# Altium footprint library PcbLib1.PcbLib: 69 footprints (part 2 of 5)
Each footprint in its own frame and in the unit in brackets; x right, y up, seen from the top. Pads: shape width x height; smd on the part's side, far side on the other; paste and mask are expansions set on the pad; w line width, h text height; cw(c..) or ccw(c..) is an arc to the next point about the centre after c.
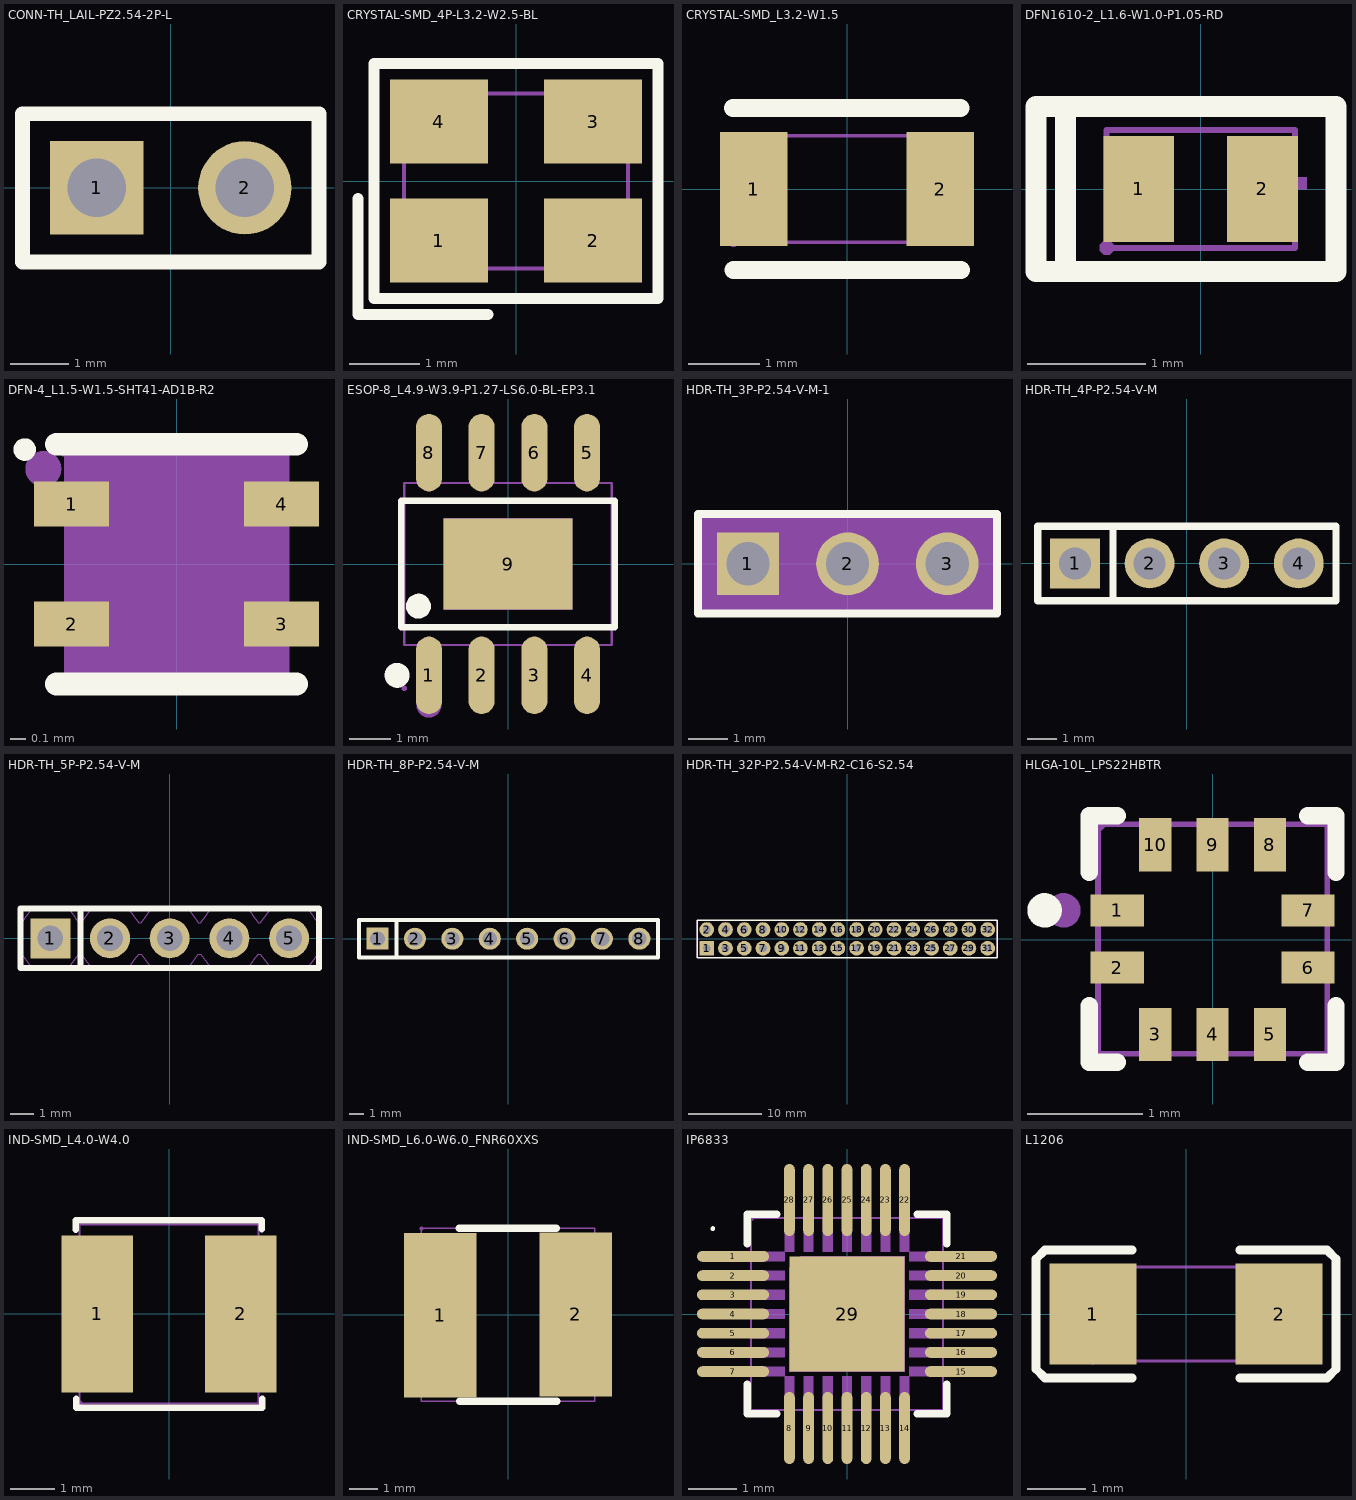
[diagram p1: the footprints below, top view; thin cyan lines are the x and y axes]

## CONN-TH_LAIL-PZ2.54-2P-L [mm]
pads (2):
  rect 1.6x1.6 hole 1 paste-2539.97 mask+0.05: 1(-1.27,0)
  round 1.6 hole 1 paste-2539.97 mask+0.05: 2(1.27,0)
Top Overlay:
  lines w0.254: -2.54,-1.27 -2.54,1.27 2.54,1.27 2.54,-1.27 -2.54,-1.27
Mechanical 6:
  lines w0.051: -2.54,-1.25 -2.54,1.25 2.54,1.25 2.54,-1.25 -2.54,-1.25
Mechanical 8:
  region: -2.48,-1.25 -2.48,-1.275 -2.515,-1.31 -2.565,-1.31 -2.6,-1.275 -2.6,-1.25 -2.6,-1.225 -2.565,-1.19 -2.515,-1.19 -2.48,-1.225 -2.48,-1.25
Mechanical 9:
  region: -1.59,0.32 -0.95,0.32 -0.95,-0.32 -1.59,-0.32
  region: 0.95,0.32 1.59,0.32 1.59,-0.32 0.95,-0.32

## CRYSTAL-SMD_4P-L3.2-W2.5-BL [mm]
pads (4):
  rect 1.4x1.2 smd: 1(-1.1,-0.85) 2(1.1,-0.85) 3(1.1,0.85) 4(-1.1,0.85)
Top Overlay:
  lines w0.152: -2.257,-0.25 -2.257,-1.907 -0.4,-1.907 ; -2.029,-1.678 -2.029,1.679 2.029,1.679 2.029,-1.678 -2.029,-1.678
Mechanical 2:
  circle w0.254: c-1.27,-0.889 r0.127
Mechanical 6:
  lines w0.051: -1.6,-1.25 -1.6,1.25 1.6,1.25 1.6,-1.25 -1.6,-1.25
Mechanical 8:
  region: -1.54,-1.25 -1.54,-1.275 -1.575,-1.31 -1.625,-1.31 -1.66,-1.275 -1.66,-1.25 -1.66,-1.225 -1.625,-1.19 -1.575,-1.19 -1.54,-1.225 -1.54,-1.25
Mechanical 9:
  region: -1.5,1.15 -0.6,1.15 -0.6,0.35 -1.5,0.35
  region: 0.6,1.15 1.5,1.15 1.5,0.35 0.6,0.35
  region: 0.6,-0.35 1.5,-0.35 1.5,-1.15 0.6,-1.15
  region: -1.5,-0.35 -0.6,-0.35 -0.6,-1.15 -1.5,-1.15

## CRYSTAL-SMD_L3.2-W1.5 [mm]
pads (2):
  rect 0.95x1.6 smd: 1(-1.308,0) 2(1.308,0)
Top Overlay:
  lines w0.254: -1.603,1.14 1.597,1.14 ; -1.597,-1.14 1.603,-1.14
Mechanical 6:
  lines w0.051: -1.597,-0.75 -1.597,0.75 1.603,0.75 1.603,-0.75 -1.597,-0.75
Mechanical 8:
  region: -1.537,-0.75 -1.537,-0.775 -1.573,-0.81 -1.622,-0.81 -1.657,-0.775 -1.657,-0.75 -1.657,-0.725 -1.622,-0.69 -1.573,-0.69 -1.537,-0.725 -1.537,-0.75
Mechanical 9:
  region: 0.853,-0.65 0.853,0.65 1.603,0.65 1.603,-0.65
  region: -1.598,-0.65 -1.598,0.65 -0.847,0.65 -0.847,-0.65

## DFN1610-2_L1.6-W1.0-P1.05-RD [mm]
pads (2):
  rect 0.6x0.9 smd: 1(-0.525,0) 2(0.525,0)
Top Overlay:
  lines w0.178: -1.15,-0.7 -1.15,0.7 ; -1.4,-0.7 1.15,-0.7 1.15,0.7 -1.4,0.7 -1.4,-0.7
Mechanical 2:
  region: 0.6,-0.2 0.6,0.3 0.7,0.3 0.7,-0.2
  region: 0.4,0.1 0.9,0.1 0.9,0 0.4,0
  region: -0.8,0.1 -0.3,0.1 -0.3,0 -0.8,0
Mechanical 6:
  lines w0.051: -0.8,-0.5 0.8,-0.5 0.8,0.5 -0.8,0.5 -0.8,-0.5
Mechanical 8:
  region: -0.74,-0.5 -0.74,-0.525 -0.775,-0.56 -0.825,-0.56 -0.86,-0.525 -0.86,-0.5 -0.86,-0.475 -0.825,-0.44 -0.775,-0.44 -0.74,-0.475 -0.74,-0.5
Mechanical 9:
  region: 0.7,0.4 0.7,-0.4 0.35,-0.4 0.35,0.4
  region: -0.35,0.4 -0.35,-0.4 -0.7,-0.4 -0.7,0.4

## DFN-4_L1.5-W1.5-SHT41-AD1B-R2 [mm]
pads (4):
  rect 0.5x0.3 smd paste+0 mask+0.051: 1(-0.7,0.4) 2(-0.7,-0.4) 3(0.7,-0.4) 4(0.7,0.4)
Top Overlay:
  circle w0.075: c-1.013,0.765 r0.038
  lines w0.152: -0.8,-0.8 0.8,-0.8 ; -0.8,0.8 0.8,0.8
Mechanical 5:
  circle w0.12: c-0.889,0.635 r0.06
Mechanical 9:
  region: -0.75,-0.75 -0.75,0.75 0.75,0.75 0.75,-0.75
Mechanical 11:
  region: -0.72,0.75 -0.72,0.738 -0.738,0.72 -0.762,0.72 -0.78,0.738 -0.78,0.75 -0.78,0.762 -0.762,0.78 -0.738,0.78 -0.72,0.762 -0.72,0.75
Mechanical 12:
  region: -0.45,0.505 -0.45,0.55 -0.68,0.55 -0.68,0.505 -0.75,0.505 -0.75,0.295 -0.68,0.295 -0.68,0.25 -0.45,0.25 -0.45,0.295
  region: -0.45,-0.295 -0.45,-0.25 -0.68,-0.25 -0.68,-0.295 -0.75,-0.295 -0.75,-0.505 -0.68,-0.505 -0.68,-0.55 -0.45,-0.55 -0.45,-0.505
  region: 0.45,-0.505 0.45,-0.55 0.68,-0.55 0.68,-0.505 0.75,-0.505 0.75,-0.295 0.68,-0.295 0.68,-0.25 0.45,-0.25 0.45,-0.295
  region: 0.45,0.295 0.45,0.25 0.68,0.25 0.68,0.295 0.75,0.295 0.75,0.505 0.68,0.505 0.68,0.55 0.45,0.55 0.45,0.505

## ESOP-8_L4.9-W3.9-P1.27-LS6.0-BL-EP3.1 [mm]
pads (9):
  oval 0.63x1.865 smd: 1(-1.905,-2.682) 2(-0.635,-2.682) 3(0.635,-2.682) 4(1.905,-2.682) 5(1.905,2.682) 6(0.635,2.682) 7(-0.635,2.682) 8(-1.905,2.682)
  rect 3.1x2.2 smd paste+0 mask+0.05: 9(0,0)
Top Overlay:
  circle w0.3: c-2.159,-1.016 r0.15
  circle w0.3: c-2.672,-2.682 r0.15
  lines w0.152: -2.576,-1.521 2.576,-1.521 2.576,1.521 -2.576,1.521 -2.576,-1.521
Mechanical 4:
  circle w0.3: c-1.905,-3.4 r0.15
Mechanical 7:
  lines w0.051: -2.5,-1.95 2.5,-1.95 2.5,1.95 -2.5,1.95 -2.5,-1.95
Mechanical 8:
  region: 1.695,1.94 1.695,2.175 2.115,2.175 2.115,1.94
  region: 0.425,1.94 0.425,2.175 0.845,2.175 0.845,1.94
  region: -0.845,1.94 -0.845,2.175 -0.425,2.175 -0.425,1.94
  region: -2.115,1.94 -2.115,2.175 -1.695,2.175 -1.695,1.94
  region: 1.695,-2.175 1.695,-1.94 2.115,-1.94 2.115,-2.175
  region: 0.425,-2.175 0.425,-1.94 0.845,-1.94 0.845,-2.175
  region: -0.845,-2.175 -0.845,-1.94 -0.425,-1.94 -0.425,-2.175
  region: -2.115,-2.175 -2.115,-1.94 -1.695,-1.94 -1.695,-2.175
Mechanical 9:
  region: -2.44,-3 -2.44,-3.025 -2.475,-3.06 -2.525,-3.06 -2.56,-3.025 -2.56,-3 -2.56,-2.975 -2.525,-2.94 -2.475,-2.94 -2.44,-2.975 -2.44,-3
Mechanical 10:
  region: -1.55,1.1 1.55,1.1 1.55,-1.1 -1.55,-1.1
  region: 1.695,2.165 1.695,3 2.115,3 2.115,2.165
  region: 0.425,2.165 0.425,3 0.845,3 0.845,2.165
  region: -0.845,2.165 -0.845,3 -0.425,3 -0.425,2.165
  region: -2.115,2.165 -2.115,3 -1.695,3 -1.695,2.165
  region: 1.695,-3 1.695,-2.165 2.115,-2.165 2.115,-3
  region: 0.425,-3 0.425,-2.165 0.845,-2.165 0.845,-3
  region: -0.845,-3 -0.845,-2.165 -0.425,-2.165 -0.425,-3
  region: -2.115,-3 -2.115,-2.165 -1.695,-2.165 -1.695,-3

## HDR-TH_3P-P2.54-V-M-1 [mm]
pads (3):
  rect 1.575x1.6 hole 1.1 paste-2539.97 mask+0.05: 1(-2.54,0)
  round 1.6 hole 1.1 paste-2539.97 mask+0.05: 2(0,0) 3(2.54,0)
Top Overlay:
  lines w0.203: -3.81,-1.27 -3.81,1.27 -1.905,1.27 3.81,1.27 3.81,-1.27 -3.81,-1.27
Mechanical 9:
  region: -3.81,-1.25 -3.81,1.25 3.81,1.25 3.81,-1.25
Mechanical 11:
  region: -3.78,-1.25 -3.78,-1.262 -3.798,-1.28 -3.822,-1.28 -3.84,-1.262 -3.84,-1.25 -3.84,-1.238 -3.822,-1.22 -3.798,-1.22 -3.78,-1.238 -3.78,-1.25
Mechanical 12:
  region: 2.22,0.32 2.86,0.32 2.86,-0.32 2.22,-0.32
  region: -0.32,0.32 0.32,0.32 0.32,-0.32 -0.32,-0.32
  region: -2.86,0.32 -2.22,0.32 -2.22,-0.32 -2.86,-0.32

## HDR-TH_4P-P2.54-V-M [mm]
pads (4):
  rect 1.7x1.7 hole 1.1: 1(-3.81,0)
  round 1.7 hole 1.1: 2(-1.27,0) 3(1.27,0) 4(3.81,0)
Top Overlay:
  lines w0.254: -2.516,-1.27 -2.516,1.27 ; -2.516,1.27 -5.08,1.27 -5.08,-1.27 5.08,-1.27 5.08,1.27 -2.516,1.27
Mechanical 6:
  lines w0.051: -5.08,-1.25 5.08,-1.25 5.08,1.25 -5.08,1.25 -5.08,-1.25
Mechanical 8:
  region: -5.02,-1.25 -5.02,-1.275 -5.055,-1.31 -5.105,-1.31 -5.14,-1.275 -5.14,-1.25 -5.14,-1.225 -5.105,-1.19 -5.055,-1.19 -5.02,-1.225 -5.02,-1.25
Mechanical 9:
  region: 3.49,0.32 4.13,0.32 4.13,-0.32 3.49,-0.32
  region: 0.95,0.32 1.59,0.32 1.59,-0.32 0.95,-0.32
  region: -1.59,0.32 -0.95,0.32 -0.95,-0.32 -1.59,-0.32
  region: -4.13,0.32 -3.49,0.32 -3.49,-0.32 -4.13,-0.32

## HDR-TH_5P-P2.54-V-M [mm]
pads (5):
  rect 1.7x1.7 hole 1.1: 1(-5.08,0)
  round 1.7 hole 1.1: 2(-2.54,0) 3(0,0) 4(2.54,0) 5(5.08,0)
Top Overlay:
  lines w0.254: -3.786,-1.27 -3.786,1.27 ; -6.35,-1.27 -6.35,1.27 6.35,1.27 6.35,-1.27 -6.35,-1.27
Mechanical 6:
  lines w0.051: -6.35,-0.67 -6.35,-0.67 -6.3,-0.67 -5.85,-1.27 -4.31,-1.27 -4.077,-0.965 -3.86,-0.67 -3.76,-0.67 -3.31,-1.27 -1.77,-1.27 -1.542,-0.972 -1.503,-0.919 -1.32,-0.67 -1.22,-0.67 -0.77,-1.27 0.77,-1.27 0.992,-0.98 1.02,-0.942 1.22,-0.67 1.32,-0.67 1.77,-1.27 3.31,-1.271 3.51,-1.009 3.545,-0.963 3.581,-0.913 3.759,-0.67 3.86,-0.67 4.31,-1.27 5.85,-1.27 6.075,-0.976 6.3,-0.67 6.35,-0.67 6.35,0.67 6.3,0.67 6.112,0.925 6.079,0.97 5.85,1.27 4.311,1.27 3.86,0.67 3.76,0.67 3.533,0.979 3.458,1.076 3.31,1.27 1.77,1.27 1.32,0.67 1.22,0.67 1.136,0.783 1.108,0.822 1.01,0.955 0.867,1.143 0.77,1.27 -0.77,1.27 -1.22,0.67 -1.32,0.67 -1.417,0.801 -1.436,0.827 -1.459,0.859 -1.546,0.976 -1.631,1.088 -1.77,1.27 -3.31,1.27 -3.76,0.67 -3.86,0.67 -4.017,0.884 -4.048,0.925 -4.149,1.059 -4.31,1.27 -5.85,1.27 -6.028,1.032 -6.299,0.67 -6.35,0.67 -6.35,-0.67 ; -6.35,-0.67 -6.35,-0.67
Mechanical 8:
  region: -6.29,-1.271 -6.29,-1.296 -6.325,-1.331 -6.375,-1.331 -6.41,-1.296 -6.41,-1.271 -6.41,-1.246 -6.375,-1.211 -6.325,-1.211 -6.29,-1.246 -6.29,-1.271
Mechanical 9:
  region: -5.4,0.32 -4.76,0.32 -4.76,-0.32 -5.4,-0.32
  region: -2.86,0.32 -2.22,0.32 -2.22,-0.32 -2.86,-0.32
  region: -0.32,0.32 0.32,0.32 0.32,-0.32 -0.32,-0.32
  region: 2.22,0.32 2.86,0.32 2.86,-0.32 2.22,-0.32
  region: 4.76,0.32 5.4,0.32 5.4,-0.32 4.76,-0.32

## HDR-TH_8P-P2.54-V-M [mm]
pads (8):
  rect 1.5x1.5 hole 1: 1(-8.89,0)
  round 1.5 hole 1: 2(-6.35,0) 3(-3.81,0) 4(-1.27,0) 5(1.27,0) 6(3.81,0) 7(6.35,0) 8(8.89,0)
Top Overlay:
  lines w0.254: -7.596,-1.27 -7.596,1.27 ; -10.16,-1.27 10.16,-1.27 10.16,1.27 -10.16,1.27 -10.16,-1.27
Mechanical 6:
  lines w0.051: -10.16,-1.25 -10.16,1.25 10.16,1.25 10.16,-1.25 -10.16,-1.25
Mechanical 8:
  region: -10.1,-1.25 -10.1,-1.275 -10.135,-1.31 -10.185,-1.31 -10.22,-1.275 -10.22,-1.25 -10.22,-1.225 -10.185,-1.19 -10.135,-1.19 -10.1,-1.225 -10.1,-1.25
Mechanical 9:
  region: -9.21,0.32 -8.57,0.32 -8.57,-0.32 -9.21,-0.32
  region: -6.67,0.32 -6.03,0.32 -6.03,-0.32 -6.67,-0.32
  region: -4.13,0.32 -3.49,0.32 -3.49,-0.32 -4.13,-0.32
  region: -1.59,0.32 -0.95,0.32 -0.95,-0.32 -1.59,-0.32
  region: 0.95,0.32 1.59,0.32 1.59,-0.32 0.95,-0.32
  region: 3.49,0.32 4.13,0.32 4.13,-0.32 3.49,-0.32
  region: 6.03,0.32 6.67,0.32 6.67,-0.32 6.03,-0.32
  region: 8.57,0.32 9.21,0.32 9.21,-0.32 8.57,-0.32

## HDR-TH_32P-P2.54-V-M-R2-C16-S2.54 [mm]
pads (32):
  rect 2x2 hole 1.05: 1(-19.05,-1.27)
  round 2 hole 1.05: 2(-19.05,1.27) 3(-16.51,-1.27) 4(-16.51,1.27) 5(-13.97,-1.27) 6(-13.97,1.27) 7(-11.43,-1.27) 8(-11.43,1.27) 9(-8.89,-1.27) 10(-8.89,1.27) 11(-6.35,-1.27) 12(-6.35,1.27) 13(-3.81,-1.27) 14(-3.81,1.27) 15(-1.27,-1.27) 16(-1.27,1.27) 17(1.27,-1.27) 18(1.27,1.27) 19(3.81,-1.27) 20(3.81,1.27) 21(6.35,-1.27) 22(6.35,1.27) 23(8.89,-1.27) 24(8.89,1.27) 25(11.43,-1.27) 26(11.43,1.27) 27(13.97,-1.27) 28(13.97,1.27) 29(16.51,-1.27) 30(16.51,1.27) 31(19.05,-1.27) 32(19.05,1.27)
Top Overlay:
  lines w0.203: -20.32,-2.54 -20.32,2.54 20.32,2.54 20.32,-2.54 -20.32,-2.54
Mechanical 6:
  lines w0.051: -20.32,-2.5 -20.32,2.5 20.32,2.5 20.32,-2.5 -20.32,-2.5
Mechanical 8:
  region: -20.26,-2.5 -20.26,-2.525 -20.295,-2.56 -20.345,-2.56 -20.38,-2.525 -20.38,-2.5 -20.38,-2.475 -20.345,-2.44 -20.295,-2.44 -20.26,-2.475 -20.26,-2.5
Mechanical 9:
  drawing of 32 lines, arcs and shapes, not listed

## HLGA-10L_LPS22HBTR [mm]
pads (10):
  rect 0.465x0.28 smd: 1(-0.832,0.255) 2(-0.832,-0.245) 6(0.832,-0.245) 7(0.832,0.255)
  rect 0.28x0.465 smd: 3(-0.5,-0.827) 4(0,-0.827) 5(0.5,-0.827) 8(0.5,0.827) 9(0,0.827) 10(-0.5,0.827)
Top Overlay:
  circle w0.15: c-1.465,0.255 r0.075
  lines w0.152: -1.076,-0.576 -1.076,-1.071 -0.831,-1.071 ; -1.076,0.585 -1.076,1.081 -0.831,1.081 ; 0.831,-1.071 1.076,-1.071 1.076,-0.576 ; 0.831,1.081 1.076,1.081 1.076,0.585
Mechanical 2:
  circle w0.15: c-1.3,0.255 r0.075
Mechanical 6:
  lines w0.051: -1,-0.995 1,-0.995 1,1.005 -1,1.005 -1,-0.995
Mechanical 8:
  region: -0.94,1.005 -0.94,0.98 -0.975,0.945 -1.025,0.945 -1.06,0.98 -1.06,1.005 -1.06,1.03 -1.025,1.065 -0.975,1.065 -0.94,1.03 -0.94,1.005
Mechanical 9:
  region: -0.9,0.38 -0.712,0.38 -0.625,0.305 -0.625,0.13 -0.9,0.13
  region: -0.9,-0.12 -0.625,-0.12 -0.625,-0.37 -0.9,-0.37
  region: -0.625,-0.62 -0.375,-0.62 -0.375,-0.895 -0.625,-0.895
  region: -0.125,-0.62 0.125,-0.62 0.125,-0.895 -0.125,-0.895
  region: 0.375,-0.62 0.625,-0.62 0.625,-0.895 0.375,-0.895
  region: 0.9,-0.12 0.625,-0.12 0.625,-0.37 0.9,-0.37
  region: 0.9,0.38 0.625,0.38 0.625,0.13 0.9,0.13
  region: 0.375,0.63 0.625,0.63 0.625,0.905 0.375,0.905
  region: -0.125,0.63 0.125,0.63 0.125,0.905 -0.125,0.905
  region: -0.625,0.63 -0.375,0.63 -0.375,0.905 -0.625,0.905

## IND-SMD_L4.0-W4.0 [mm]
pads (2):
  rect 1.6x3.5 smd: 1(-1.6,0) 2(1.6,0)
Top Overlay:
  lines w0.15: -2.08,1.88 -2.083,2.095 2.07,2.095 2.07,1.9 ; -2.07,-1.89 -2.07,-2.096 2.082,-2.096 2.08,-1.9
Mechanical 6:
  lines w0.051: -2,-2 -2,2 2,2 2,-2 -2,-2
Mechanical 8:
  region: -1.94,-2 -1.94,-2.025 -1.975,-2.06 -2.025,-2.06 -2.06,-2.025 -2.06,-2 -2.06,-1.975 -2.025,-1.94 -1.975,-1.94 -1.94,-1.975 -1.94,-2
Mechanical 9:
  region: 1.05,1.65 2,1.65 2,-1.65 1.05,-1.65
  region: -2,1.65 -1.05,1.65 -1.05,-1.65 -2,-1.65

## IND-SMD_L6.0-W6.0_FNR60XXS [mm]
pads (2):
  rect 2.5x5.7 smd: 1(-2.35,-0.013) 2(2.35,0.013)
Top Overlay:
  lines w0.254: -1.693,3 1.671,3 ; -1.671,-3 1.693,-3
Mechanical 6:
  lines w0.051: -3,-3 -3,3 3,3 3,-3 -3,-3
Mechanical 8:
  region: -2.94,3 -2.94,2.975 -2.975,2.94 -3.025,2.94 -3.06,2.975 -3.06,3 -3.06,3.025 -3.025,3.06 -2.975,3.06 -2.94,3.025 -2.94,3
Mechanical 9:
  region: 1.45,-2.437 1.45,2.463 3,2.463 3,-2.437
  region: -1.45,2.437 -1.45,-2.463 -3,-2.463 -3,2.437

## IP6833 [mil]
pads (29):
  oval 59x8.82 smd paste+0 mask+2: 1(-93.49,47.24) 2(-93.5,31.5) 3(-93.5,15.75) 4(-93.5,0) 5(-93.5,-15.75) 6(-93.5,-31.5) 7(-93.5,-47.24)
  oval 8.82x59 smd paste+0 mask+2: 8(-47.24,-93.5)
  oval 8.82x59 smd paste-99999 mask+2: 9(-31.5,-93.5) 10(-15.75,-93.5) 11(0,-93.5) 12(15.75,-93.5) 13(31.5,-93.5) 14(47.24,-93.5) 22(47.24,93.5) 23(31.5,93.5) 24(15.75,93.5) 25(0,93.5) 26(-15.75,93.5) 27(-31.5,93.5) 28(-47.24,93.5)
  oval 59x8.82 smd paste-99999 mask+2: 15(93.5,-47.24) 16(93.5,-31.5) 17(93.5,-15.75) 18(93.5,0) 19(93.5,15.75) 20(93.5,31.5) 21(93.49,47.24)
  rect 94.49x94.49 smd paste-99999 mask+2: 29(0,0)
Top Overlay:
  circle w1.97: c-110,70 r0.98
  lines w6: -81.74,-57.65 -81.74,-81.74 -57.65,-81.74 ; -81.74,57.65 -81.74,81.74 -57.65,81.74 ; 57.65,-81.74 81.74,-81.74 81.74,-57.65 ; 57.65,81.74 81.74,81.74 81.74,57.65
Mechanical 6:
  circle w1.97: c-105.15,47.24 r0.98
Mechanical 7:
  lines w2: -78.74,-78.74 -78.74,78.74 78.74,78.74 78.74,-78.74 -78.74,-78.74
Mechanical 8:
  region: -76.38,78.74 -76.38,77.76 -77.76,76.38 -79.72,76.38 -81.1,77.76 -81.1,78.74 -81.1,79.72 -79.72,81.1 -77.76,81.1 -76.38,79.72 -76.38,78.74
Mechanical 9:
  region: -37.8,47.24 47.24,47.24 47.24,-47.24 -47.24,-47.24 -47.24,37.8
  region: -51.18,78.74 -43.31,78.74 -43.31,51.18 -51.18,51.18
  region: -35.43,78.74 -27.56,78.74 -27.56,51.18 -35.43,51.18
  region: -19.68,78.74 -11.81,78.74 -11.81,51.18 -19.68,51.18
  region: -3.94,78.74 3.94,78.74 3.94,51.18 -3.94,51.18
  region: 11.81,78.74 19.68,78.74 19.68,51.18 11.81,51.18
  region: 27.56,78.74 35.43,78.74 35.43,51.18 27.56,51.18
  region: 43.31,78.74 51.18,78.74 51.18,51.18 43.31,51.18
  region: 78.74,43.31 51.18,43.31 51.18,51.18 78.74,51.18
  region: 78.74,27.56 51.18,27.56 51.18,35.43 78.74,35.43
  region: 78.74,11.81 51.18,11.81 51.18,19.68 78.74,19.68
  region: 78.74,-3.94 51.18,-3.94 51.18,3.94 78.74,3.94
  region: 78.74,-19.68 51.18,-19.68 51.18,-11.81 78.74,-11.81
  region: 78.74,-35.43 51.18,-35.43 51.18,-27.56 78.74,-27.56
  region: 78.74,-51.18 51.18,-51.18 51.18,-43.31 78.74,-43.31
  region: 43.31,-78.74 51.18,-78.74 51.18,-51.18 43.31,-51.18
  region: 27.56,-78.74 35.43,-78.74 35.43,-51.18 27.56,-51.18
  region: 11.81,-78.74 19.68,-78.74 19.68,-51.18 11.81,-51.18
  region: -3.94,-78.74 3.94,-78.74 3.94,-51.18 -3.94,-51.18
  region: -19.68,-78.74 -11.81,-78.74 -11.81,-51.18 -19.68,-51.18
  region: -35.43,-78.74 -27.56,-78.74 -27.56,-51.18 -35.43,-51.18
  region: -51.18,-78.74 -43.31,-78.74 -43.31,-51.18 -51.18,-51.18
  region: -78.74,-51.18 -51.18,-51.18 -51.18,-43.31 -78.74,-43.31
  region: -78.74,-35.43 -51.18,-35.43 -51.18,-27.56 -78.74,-27.56
  region: -78.74,-19.68 -51.18,-19.68 -51.18,-11.81 -78.74,-11.81
  region: -78.74,-3.94 -51.18,-3.94 -51.18,3.94 -78.74,3.94
  region: -78.74,11.81 -51.18,11.81 -51.18,19.68 -78.74,19.68
  region: -78.74,27.56 -51.18,27.56 -51.18,35.43 -78.74,35.43
  region: -78.74,43.31 -51.18,43.31 -51.18,51.18 -78.74,51.18

## L1206 [mm]
pads (2):
  rect 1.485x1.728 smd paste-100 mask+0.051: 1(-1.593,0) 2(1.593,0)
Top Overlay:
  lines w0.152: -0.926,-1.093 -2.411,-1.093 -2.564,-0.94 -2.564,0.94 -2.411,1.093 -0.926,1.093 ; 0.926,-1.093 2.411,-1.093 2.564,-0.94 2.564,0.94 2.411,1.093 0.926,1.093
Top Paste:
  region: 0.85,-0.764 0.85,-0.394 0.95,-0.294 1.255,-0.294 1.355,-0.194 1.355,0.194 1.255,0.294 0.95,0.294 0.85,0.394 0.85,0.764 0.95,0.864 2.235,0.864 2.335,0.764 2.335,-0.764 2.235,-0.864 0.95,-0.864
  region: -0.85,-0.764 -0.85,-0.394 -0.95,-0.294 -1.255,-0.294 -1.355,-0.194 -1.355,0.194 -1.255,0.294 -0.95,0.294 -0.85,0.394 -0.85,0.764 -0.95,0.864 -2.235,0.864 -2.335,0.764 -2.335,-0.764 -2.235,-0.864 -0.95,-0.864
Mechanical 6:
  lines w0.051: -1.6,-0.8 -1.6,0.8 1.6,0.8 1.6,-0.8 -1.6,-0.8
Mechanical 8:
  region: -1.54,-0.8 -1.54,-0.825 -1.575,-0.86 -1.625,-0.86 -1.66,-0.825 -1.66,-0.8 -1.66,-0.775 -1.625,-0.74 -1.575,-0.74 -1.54,-0.775 -1.54,-0.8
Mechanical 9:
  region: -1.6,-0.8 -1.6,0.8 -1.1,0.8 -1.1,-0.8
  region: 1.6,-0.8 1.6,0.8 1.1,0.8 1.1,-0.8